# Altium footprint library DS04254203BKSMT.PcbLib: 1 footprints
Each footprint in its own frame and in the unit in brackets; x right, y up, seen from the top. Pads: shape width x height; smd on the part's side, far side on the other; paste and mask are expansions set on the pad; w line width, h text height; cw(c..) or ccw(c..) is an arc to the next point about the centre after c.
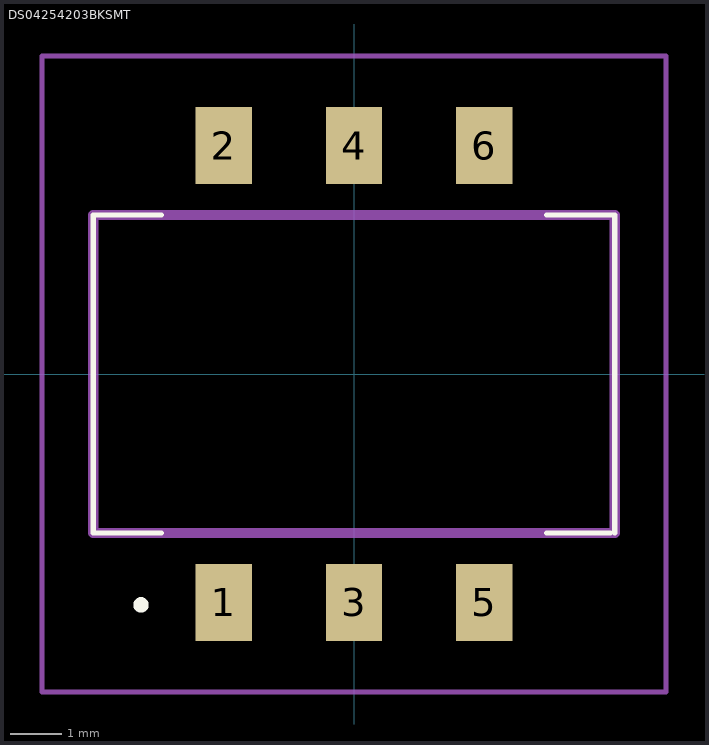
[diagram p0: the footprint, top view; thin cyan lines are the x and y axes]

## DS04254203BKSMT [mm]
pads (6):
  rect 1.1x1.5 smd: 1(-2.54,-4.45) 2(-2.54,4.45) 3(0,-4.45) 4(0,4.45) 5(2.54,-4.45) 6(2.54,4.45)
Top Overlay:
  lines w0.1: -5.08,-3.1 -5.08,3.1 ; -5.08,-3.1 -5.08,-3.1 ; -5.08,-3.1 -5.08,3.1 ; -5.08,-3.1 -3.75,-3.1 ; -5.08,-3.1 -3.75,-3.1 ; -5.08,-3.1 -5.08,-3.1 ; -5.08,3.1 -3.75,3.1 ; -5.08,3.1 -3.75,3.1 ; -5.08,3.1 -5.08,3.1 ; -5.08,3.1 -5.08,3.1 ; -3.75,-3.1 -3.75,-3.1 ; -3.75,3.1 -3.75,3.1 ; 3.75,-3.1 5,-3.1 ; 3.75,-3.1 5,-3.1 ; 3.75,-3.1 3.75,-3.1 ; 3.75,3.1 5.08,3.1 ; 3.75,3.1 5.08,3.1 ; 3.75,3.1 3.75,3.1 ; 5,-3.1 5,-3.1 ; 5.08,-3.1 5.08,3.1 ; 5.08,-3.1 5.08,-3.1 ; 5.08,-3.1 5.08,3.1 ; 5.08,3.1 5.08,3.1 ; 5.08,3.1 5.08,3.1
  lines w0.2: -4.2,-4.5 -4.2,-4.5 ; -4.2,-4.5 ccw(c-4.15,-4.5) -4.1,-4.5 ; -4.2,-4.5 cw(c-4.15,-4.5) -4.1,-4.5 ; -4.2,-4.5 -4.2,-4.5 ; -4.2,-4.5 ccw(c-4.15,-4.5) -4.1,-4.5 ; -4.1,-4.5 -4.1,-4.5
Mechanical 15:
  lines w0.2: -5.08,-3.1 5.08,-3.1 5.08,3.1 -5.08,3.1 -5.08,-3.1
Mechanical 20:
  lines w0.1: -6.08,-6.2 6.08,-6.2 6.08,6.2 -6.08,6.2 -6.08,-6.2